# Altium footprint library Package_SON.PcbLib: 1 footprints
Each footprint in its own frame and in the unit in brackets; x right, y up, seen from the top. Pads: shape width x height; smd on the part's side, far side on the other; paste and mask are expansions set on the pad; w line width, h text height; cw(c..) or ccw(c..) is an arc to the next point about the centre after c.
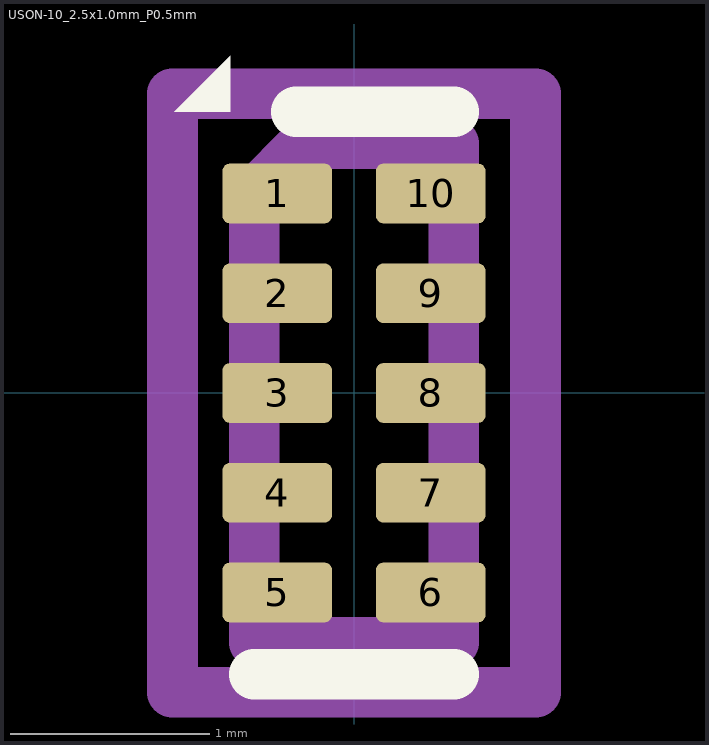
[diagram p0: the footprint, top view; thin cyan lines are the x and y axes]

## USON-10_2.5x1.0mm_P0.5mm [mm]
pads (10):
  rrect25% 0.55x0.3 smd: 1(-0.385,1) 2(-0.385,0.5) 3(-0.385,0) 4(-0.385,-0.5) 5(-0.385,-1) 6(0.385,-1) 7(0.385,-0.5) 8(0.385,0) 9(0.385,0.5) 10(0.385,1)
F.SilkS:
  region: -0.62,1.41 -0.9,1.41 -0.62,1.69
  lines w0.254: -0.5,-1.41 0.5,-1.41 ; -0.29,1.41 0.5,1.41
F.CrtYd:
  lines w0.254: -0.91,-1.5 -0.91,1.5 0.91,1.5 0.91,-1.5 -0.91,-1.5
F.Fab:
  lines w0.254: -0.5,-1.25 -0.5,1 -0.25,1.25 0.5,1.25 0.5,-1.25 -0.5,-1.25
  text "'.Designator'" at 0.48,-2.243 h0.55